# Altium footprint library FM24W256-GTR.PcbLib: 1 footprints
Each footprint in its own frame and in the unit in brackets; x right, y up, seen from the top. Pads: shape width x height; smd on the part's side, far side on the other; paste and mask are expansions set on the pad; w line width, h text height; cw(c..) or ccw(c..) is an arc to the next point about the centre after c.
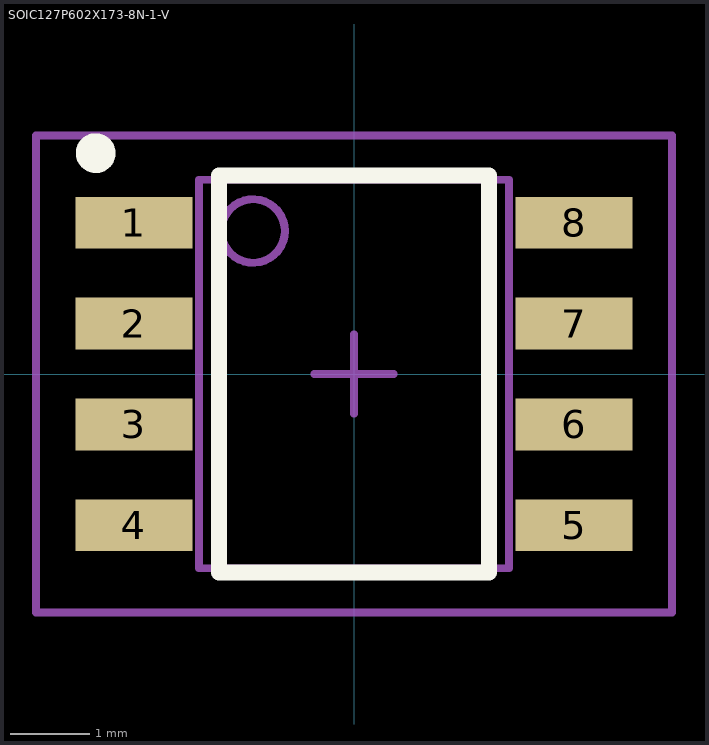
[diagram p0: the footprint, top view; thin cyan lines are the x and y axes]

## SOIC127P602X173-8N-1-V [mm] "SOIC,1.27mm pitch;8 pin,3.899mm W X 4.889mm L X 1.727mm H body"
height 1.727
pads (8):
  rect 1.47x0.65 smd paste+0 mask+0: 1(-2.77,1.905) 2(-2.77,0.635) 3(-2.77,-0.635) 4(-2.77,-1.905) 5(2.77,-1.905) 6(2.77,-0.635) 7(2.77,0.635) 8(2.77,1.905)
Top Overlay:
  circle w0.25: c-3.251,2.78 r0.125
  lines w0.2: -1.7,-2.5 -1.7,2.5 1.7,2.5 1.7,-2.5 -1.7,-2.5
M3 (ASY_Text_Top):
  text ".DESIGNATOR" at -3.643,-0.385 h1.2
M13 (CMP_Body_OTL_Top):
  circle w0.1: c-1.27,1.8 r0.4
  lines w0.1: -1.949,-2.445 -1.949,2.445 1.949,2.445 1.949,-2.445 -1.949,-2.445
M15 (CMP_Courtyard_Top):
  lines w0.1: -0.5,0 0.5,0 ; 0,-0.5 0,0.5 ; -4.005,-3 -4.005,3 4.005,3 4.005,-3 -4.005,-3
3D body "PG-DSO-8-802_51-85066_V0I_3D.stp": height 1.74, standoff 0, extent -3.01,-2.444 3.01,2.445